# Altium schematic symbol library Markers-Modules.SchLib: 9 symbols
Pins are listed as number, name and electrical type; pins without a type are passive.

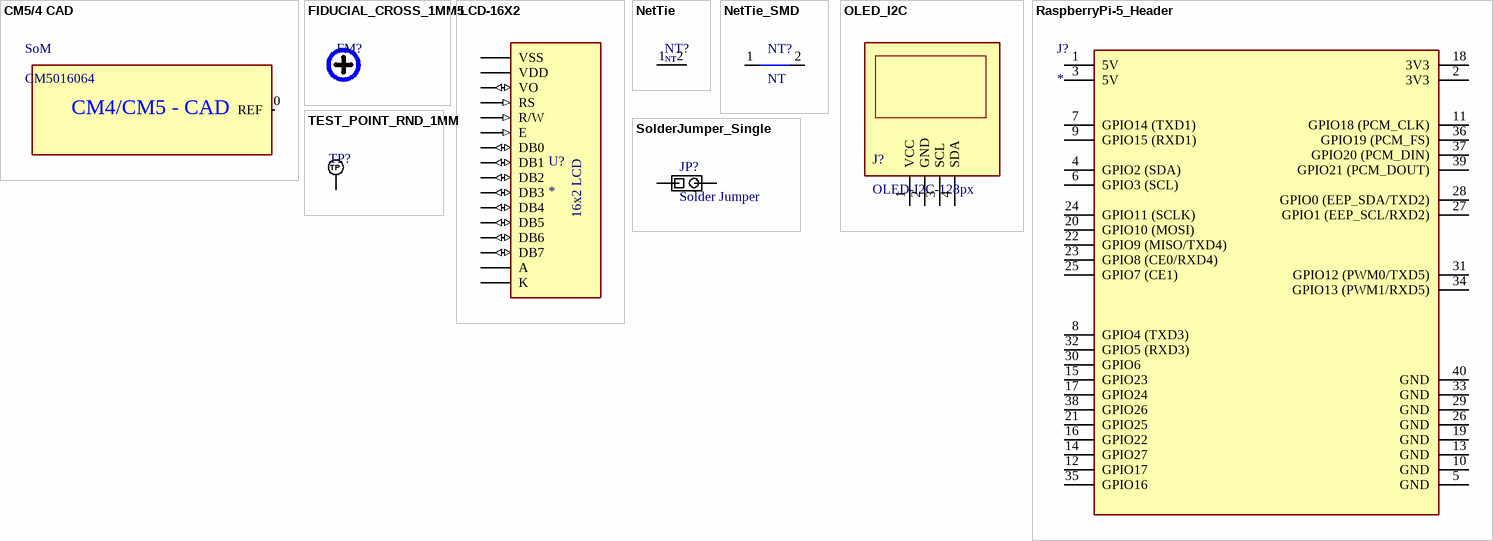
[diagram p0: symbols CM5/4 CAD to TEST_POINT_RND_1MM]

## CM5/4 CAD
designator SoM, comment CM5016064
System-On-Module, RPI CM5, 16GB LPDDR4, 2.4GHz, BCM2712, 64-bit ARM Cortex-A76 v8, 64GB eMMC; Manufacturer Part Number: CM5016064 / SC1578; Manufacturer: Raspberry Pi; Max Current: 2000mA; Supply Voltage: 5V; Est Price INR: 30,746.39; Population Status: YES; Height: 9.9mm; Supplier Part Number: 358-SC1578; Weight: 10g; Package: SoM 200Pin; Supplier: Mouser; Temperature Range: -20 to 85
footprint CM5/CM4 - DXF
pins: 0 REF
text: CM4/CM5 - CAD

## FIDUCIAL_CROSS_1MM5
designator FM?, comment Fiducial Marker  (value not drawn)  (no BOM)
Fiducial Marker Cross 1.5mm NO BOM
footprint FIDUCIAL_CROSS_1MM5

## LCD-16X2
designator U?
Display Development Tools 16x2 Black on Green Char LCD w Backlight; Manufacturer: Gravitech; Manufacturer Part Number: LCD-16X2; Population Status: YES; Package: None
footprint MODULE_LCD-16X2
pins: 1 VSS (power), 2 VDD (power), 3 VO (io), 4 RS (in), 5 R/W (in), 6 E (in), 7 DB0 (io), 8 DB1 (io), 9 DB2 (io), 10 DB3 (io), 11 DB4 (io), 12 DB5 (io), 13 DB6 (io), 14 DB7 (io), 15 A (power), 16 K (power)
text: 16x2 LCD

## NetTie
designator NT?, comment NT  (value not drawn)  (net tie, no BOM)
Net Tie
footprint NETTIE
pins: 1, 2

## NetTie_SMD
designator NT?, comment NT  (net tie, no BOM)
Net Tie SMD
footprint NETTIE_SMD
pins: 1, 2

## OLED_I2C
designator J?, comment OLED-I2C-128px
Population Status: YES
footprint OLED-I2C
pins: 1 VCC, 2 GND, 3 SCL, 4 SDA

## RaspberryPi-5_Header
designator J?
Connector; Manufacturer: NELTRON; Manufacturer Part Number: 2214S-40SG-85; Population Status: YES; Height: 8.5mm
footprint 2214S40SG85_Bottom_RPI (Footprint not found)
pins: 1 5V, 2 3V3, 3 5V, 4 GPIO2 (SDA), 5 GND, 6 GPIO3 (SCL), 7 GPIO14 (TXD1), 8 GPIO4 (TXD3), 9 GPIO15 (RXD1), 10 GND, 11 GPIO18 (PCM_CLK), 12 GPIO17, 13 GND, 14 GPIO27, 15 GPIO23, 16 GPIO22, 17 GPIO24, 18 3V3, 19 GND, 20 GPIO10 (MOSI), 21 GPIO25, 22 GPIO9 (MISO/TXD4), 23 GPIO8 (CE0/RXD4), 24 GPIO11 (SCLK), 25 GPIO7 (CE1), 26 GND, 27 GPIO1 (EEP_SCL/RXD2), 28 GPIO0 (EEP_SDA/TXD2), 29 GND, 30 GPIO6, 31 GPIO12 (PWM0/TXD5), 32 GPIO5 (RXD3), 33 GND, 34 GPIO13 (PWM1/RXD5), 35 GPIO16, 36 GPIO19 (PCM_FS), 37 GPIO20 (PCM_DIN), 38 GPIO26, 39 GPIO21 (PCM_DOUT), 40 GND

## SolderJumper_Single
designator JP?, comment Solder Jumper
Solder Jumper Single 0.5mm Pitch
footprint SolderJumper_Single
pins: 1, 2

## TEST_POINT_RND_1MM
designator TP?, comment TP_NOBOM  (value not drawn)  (no BOM)
Test Point Round 1mm (NO BOM)
footprint PAD_RND_1MM
pins: 1 TP